# Altium footprint library INDM7066X300N.PcbLib: 1 footprints
Each footprint in its own frame and in the unit in brackets; x right, y up, seen from the top. Pads: shape width x height; smd on the part's side, far side on the other; paste and mask are expansions set on the pad; w line width, h text height; cw(c..) or ccw(c..) is an arc to the next point about the centre after c.
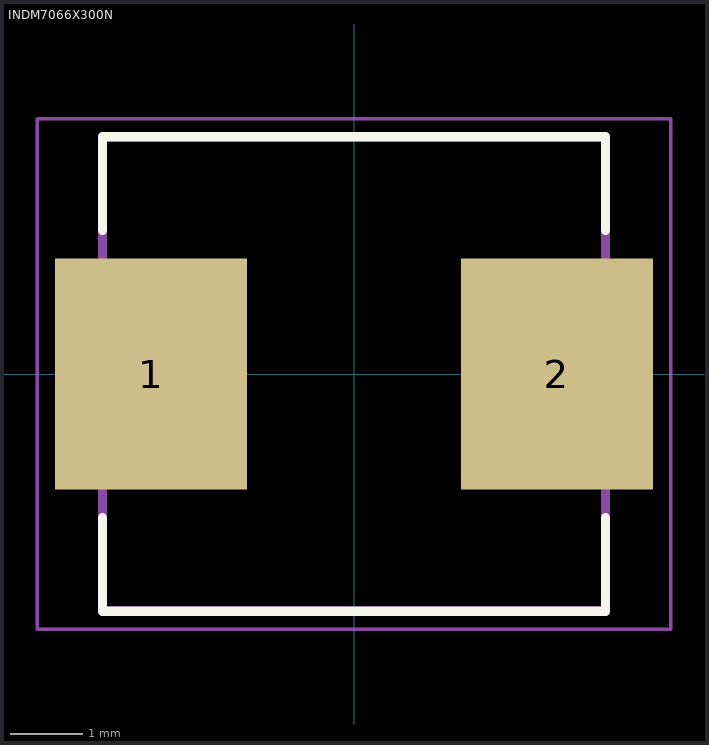
[diagram p0: the footprint, top view; thin cyan lines are the x and y axes]

## INDM7066X300N [mm]
height 3
pads (2):
  rect 2.67x3.21 smd: 1(-2.82,0) 2(2.82,0)
Top Overlay:
  lines w0.127: -3.5,-2 -3.5,-3.3 3.5,-3.3 3.5,-2 ; -3.5,2 -3.5,3.3 3.5,3.3 3.5,2
Mechanical 13:
  lines w0.127: -3.5,-3.3 -3.5,3.3 3.5,3.3 3.5,-3.3 -3.5,-3.3
Mechanical 15:
  lines w0.05: -4.405,-3.55 -4.405,3.55 4.405,3.55 4.405,-3.55 -4.405,-3.55
3D body "IND-SMD_L7_0-W6_6_FXL0630-1R5-M_C167217.step": height 3.1, standoff 0, extent -3.5,-3.3 3.5,3.301